# Altium footprint library SS16.PcbLib: 3 footprints
Each footprint in its own frame and in the unit in brackets; x right, y up, seen from the top. Pads: shape width x height; smd on the part's side, far side on the other; paste and mask are expansions set on the pad; w line width, h text height; cw(c..) or ccw(c..) is an arc to the next point about the centre after c.
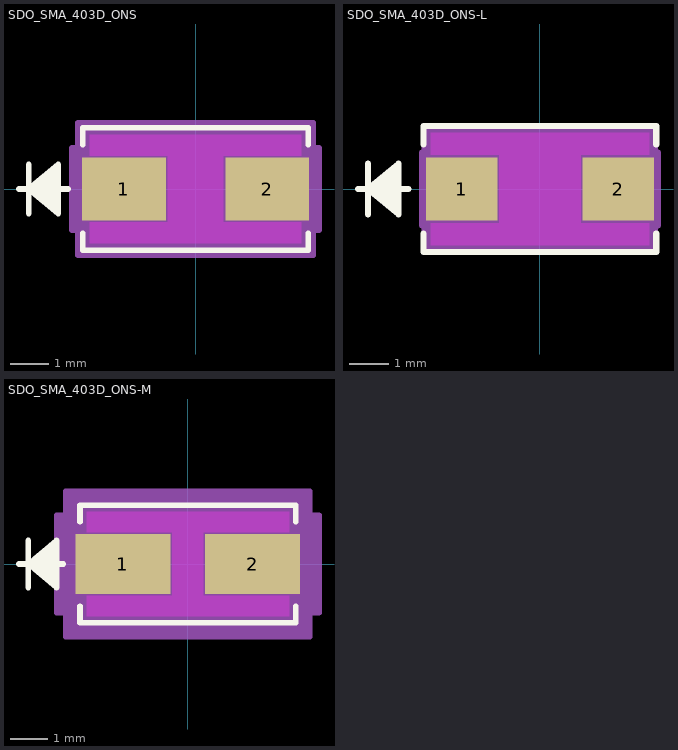
[diagram p0: the footprints below, top view; thin cyan lines are the x and y axes]

## SDO_SMA_403D_ONS [mil]
pads (2):
  rect 85.59x64 smd paste+0 mask+0: 1(-73.11,0) 2(73.11,0)
Top Layer keep-out:
  region: -28.32,-34 -28.32,34 28.32,34 28.32,-34
  region: -108,34 -108,55.5 108,55.5 108,34
  region: -108,-55.5 -108,-34 108,-34 108,-55.5
Top Overlay:
  lines w6: -180,0 -130,0 ; -170,-25 -170,25 ; -140,-20 -170,0 ; -140,-15 -170,0 ; -140,-10 -170,0 ; -140,-5 -170,0 ; -140,5 -170,0 ; -140,10 -170,0 ; -140,15 -170,0 ; -140,20 -170,0 ; -115,-45.1 -115,-62.5 115,-62.5 115,-45.1 ; -115,45.1 -115,62.5 115,62.5 115,45.1 ; -170,0 -140,25 -140,-25 -170,0
  text ".Designator" at -137.5,-25 h50
Keep-Out Layer:
  region: -28.32,-34 -28.32,34 28.32,34 28.32,-34
Mechanical 13:
  lines w1: -180,0 -130,0 ; -170,-25 -170,25 ; -140,-20 -170,0 ; -140,-15 -170,0 ; -140,-10 -170,0 ; -140,-5 -170,0 ; -140,5 -170,0 ; -140,10 -170,0 ; -140,15 -170,0 ; -140,20 -170,0 ; -170,0 -140,25 -140,-25 -170,0 ; -110,-57.5 110,-57.5 110,57.5 -110,57.5 -110,-57.5
  text ".Designator" at -137.5,-25 h50
Mechanical 15:
  region: -120,-42 -125.91,-42 -125.91,42 -120,42 -120,67.5 120,67.5 120,42 125.91,42 125.91,-42 120,-42 120,-67.5 -120,-67.5
  lines w6: -125.91,-42 -125.91,42 -120,42 -120,67.5 120,67.5 120,42 125.91,42 125.91,-42 120,-42 120,-67.5 -120,-67.5 -120,-42 -125.91,-42
3D body "SDO_SMA_403D_ONS.step": height 89.02, standoff 0, extent -110,-57.48 110,57.48

## SDO_SMA_403D_ONS-L [mil]
pads (2):
  rect 70.63x62.03 smd paste+0 mask+0: 1(-77.44,0) 2(77.44,0)
Top Layer keep-out:
  region: -40.13,-34 -40.13,34 40.13,34 40.13,-34
  region: -108,34 -108,55.5 108,55.5 108,34
  region: -108,-55.5 -108,-34 108,-34 108,-55.5
Top Overlay:
  lines w6: -180,0 -130,0 ; -170,-25 -170,25 ; -140,-20 -170,0 ; -140,-15 -170,0 ; -140,-10 -170,0 ; -140,-5 -170,0 ; -140,5 -170,0 ; -140,10 -170,0 ; -140,15 -170,0 ; -140,20 -170,0 ; -115,-43.92 -115,-62.5 115,-62.5 115,-43.92 ; -115,43.92 -115,62.5 115,62.5 115,43.92 ; -170,0 -140,25 -140,-25 -170,0
  text ".Designator" at -137.5,-25 h50
Keep-Out Layer:
  region: -40.13,-34 -40.13,34 40.13,34 40.13,-34
Mechanical 13:
  lines w1: -180,0 -130,0 ; -170,-25 -170,25 ; -140,-20 -170,0 ; -140,-15 -170,0 ; -140,-10 -170,0 ; -140,-5 -170,0 ; -140,5 -170,0 ; -140,10 -170,0 ; -140,15 -170,0 ; -140,20 -170,0 ; -170,0 -140,25 -140,-25 -170,0 ; -110,-57.5 110,-57.5 110,57.5 -110,57.5 -110,-57.5
  text ".Designator" at -137.5,-25 h50
Mechanical 15:
  region: -114,-36 -116.76,-36 -116.76,36 -114,36 -114,61.5 114,61.5 114,36 116.76,36 116.76,-36 114,-36 114,-61.5 -114,-61.5
  lines w6: -116.76,-36 -116.76,36 -114,36 -114,61.5 114,61.5 114,36 116.76,36 116.76,-36 114,-36 114,-61.5 -114,-61.5 -114,-36 -116.76,-36
3D body "SDO_SMA_403D_ONS.step": height 89.02, standoff 0, extent -110,-57.48 110,57.48

## SDO_SMA_403D_ONS-M [mil]
pads (2):
  rect 101.34x64 smd paste+0 mask+0: 1(-69.17,0) 2(69.17,0)
Top Layer keep-out:
  region: -16.5,-34 -16.5,34 16.5,34 16.5,-34
  region: -108,34 -108,55.5 108,55.5 108,34
  region: -108,-55.5 -108,-34 108,-34 108,-55.5
Top Overlay:
  lines w6: -180,0 -132.94,0 ; -170,-25 -170,25 ; -140,-20 -170,0 ; -140,-15 -170,0 ; -140,-10 -170,0 ; -140,-5 -170,0 ; -140,5 -170,0 ; -140,10 -170,0 ; -140,15 -170,0 ; -140,20 -170,0 ; -115,-45.1 -115,-62.5 115,-62.5 115,-45.1 ; -115,45.1 -115,62.5 115,62.5 115,45.1 ; -170,0 -140,25 -140,-25 -170,0
  text ".Designator" at -137.5,-25 h50
Keep-Out Layer:
  region: -16.5,-34 -16.5,34 16.5,34 16.5,-34
Mechanical 13:
  lines w1: -180,0 -130,0 ; -170,-25 -170,25 ; -140,-20 -170,0 ; -140,-15 -170,0 ; -140,-10 -170,0 ; -140,-5 -170,0 ; -140,5 -170,0 ; -140,10 -170,0 ; -140,15 -170,0 ; -140,20 -170,0 ; -170,0 -140,25 -140,-25 -170,0 ; -110,-57.5 110,-57.5 110,57.5 -110,57.5 -110,-57.5
  text ".Designator" at -137.5,-25 h50
Mechanical 15:
  region: -130,-52 -139.84,-52 -139.84,52 -130,52 -130,77.5 130,77.5 130,52 139.84,52 139.84,-52 130,-52 130,-77.5 -130,-77.5
  lines w6: -139.84,-52 -139.84,52 -130,52 -130,77.5 130,77.5 130,52 139.84,52 139.84,-52 130,-52 130,-77.5 -130,-77.5 -130,-52 -139.84,-52
3D body "SDO_SMA_403D_ONS.step": height 89.02, standoff 0, extent -110,-57.48 110,57.48